# Altium schematic symbol library Dual-Color_LED.SchLib: 1 symbol
Pins are listed as number, name and electrical type; pins without a type are passive.

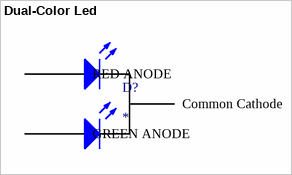
[diagram p0: symbol Dual-Color Led]

## Dual-Color Led
designator D?
footprint Dual-Color Led (Dual-Color Led radial pitch 2.54mm)
pins: 1 RED ANODE, 2 K, 3 GREEN ANODE, 4 K, 5 Common Cathode